# Altium footprint library Connectors.PcbLib: 113 footprints (part 7 of 8)
Each footprint in its own frame and in the unit in brackets; x right, y up, seen from the top. Pads: shape width x height; smd on the part's side, far side on the other; paste and mask are expansions set on the pad; w line width, h text height; cw(c..) or ccw(c..) is an arc to the next point about the centre after c.
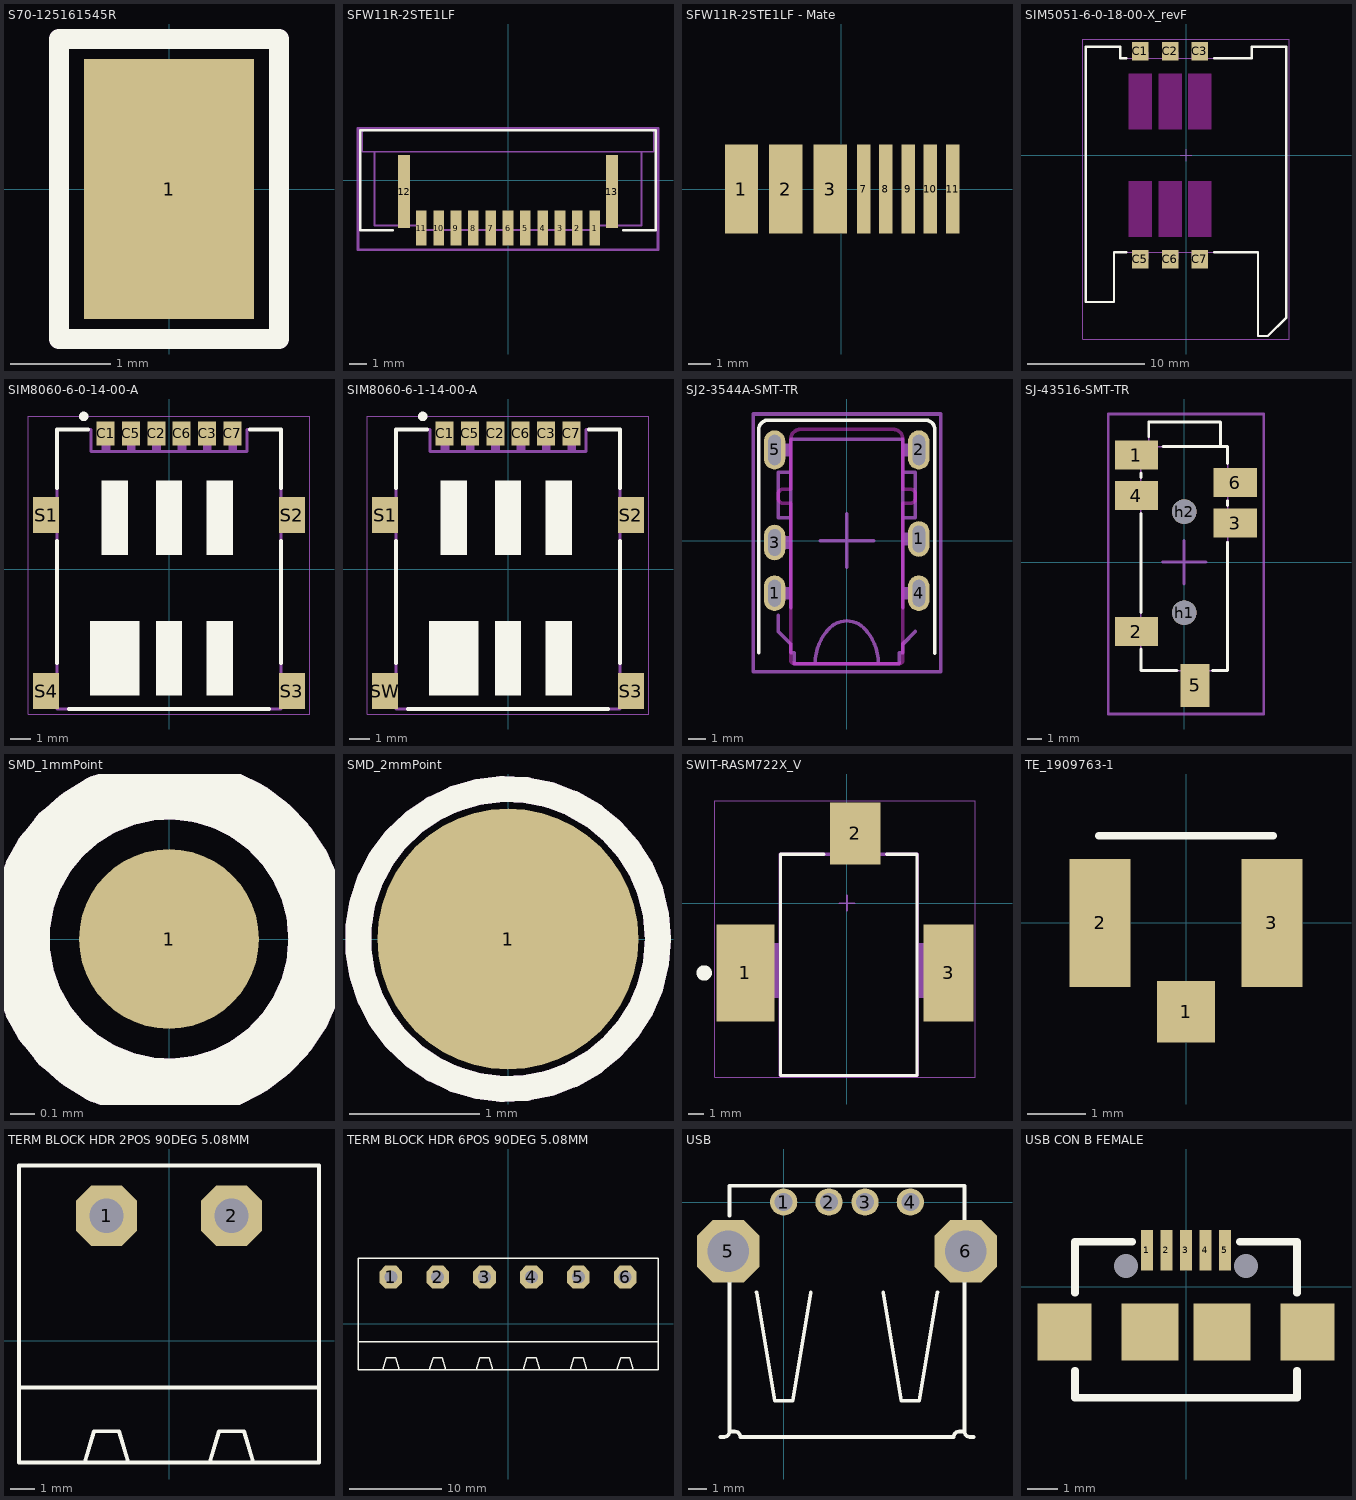
[diagram p6: the footprints below, top view; thin cyan lines are the x and y axes]

## S70-125161545R [mm] "Pin Header, pitch 2.54 mm, THT, Vertical, single row, 4p"
height 8.54
pads (1):
  rect 1.7x2.6 smd: 1(0,0)
Top Overlay:
  lines w0.2: -1.1,-1.5 1.1,-1.5 1.1,1.5 -1.1,1.5 -1.1,-1.5
Top Assembly:
  lines w0.2: -1.1,-1.5 1.1,-1.5 1.1,1.5 -1.1,1.5 -1.1,-1.5
  text ".Designator" at 0.167,-2.499 h0.5
3D body "S70-125161545R v1.step": height 0.16, standoff 0.01, extent -0.8,-1.25 0.8,1.25

## SFW11R-2STE1LF [mil]
pads (13):
  rect 24x79 smd: 1(196.85,-108.5) 2(157.48,-108.5) 3(118.11,-108.5) 4(78.74,-108.5) 5(39.37,-108.5) 6(0,-108.5) 7(-39.37,-108.5) 8(-78.74,-108.5) 9(-118.11,-108.5) 10(-157.48,-108.5) 11(-196.85,-108.5)
  rect 28x165 smd: 12(-236,-25.5) 13(236,-25.5)
Top Overlay:
  lines w6: -261.89,-113.5 -335.5,-113.5 -335.5,113.5 335.5,113.5 335.5,-113.5 261.89,-113.5
Top Assembly:
  rectangle: -201.78,-144.07 -191.94,-112.57
  rectangle: -162.41,-144.07 -152.57,-112.57
  rectangle: -123.04,-144.07 -113.2,-112.57
  rectangle: -83.67,-144.07 -73.83,-112.57
  rectangle: -44.3,-144.07 -34.46,-112.57
  rectangle: -4.93,-144.07 4.91,-112.57
  rectangle: 34.44,-144.07 44.28,-112.57
  rectangle: 73.81,-144.07 83.65,-112.57
  rectangle: 113.18,-144.07 123.02,-112.57
  rectangle: 152.55,-144.07 162.39,-112.57
  rectangle: 191.92,-144.07 201.76,-112.57
  lines w3.94: -330.71,111.84 ccw(c-330.7,111.83) -330.71,111.83 ; -330.71,111.84 cw(c-326.71,107.84) -326.71,113.5 -303.16,113.5 303.16,113.5 326.71,113.5 cw(c326.71,107.84) 330.71,111.84 ; -330.71,111.83 -330.71,64.59 -303.16,64.59 ; -303.16,64.59 303.16,64.59 ; -303.16,64.59 -303.16,-102.73 -201.78,-102.73 -201.78,-112.57 201.78,-112.57 201.78,-102.73 303.16,-102.73 303.16,64.59 ; 303.16,64.59 330.71,64.59 330.71,111.83 ; 330.71,111.83 ccw(c330.7,111.83) 330.71,111.84
  text ".Designator" at -196.79,-13.12 h39.37
Mechanical 15:
  lines w6: -340.5,-158 -340.5,118.5 340.5,118.5 340.5,-158 -340.5,-158
3D body "SFW11R-2STE1LF--3DModel-STEP-533217.STEP": height 106.3, standoff -0.02, extent -330.71,-144.06 330.71,111.84

## SFW11R-2STE1LF - Mate [mm]
pads (8):
  rect 1.5x4 smd paste-1.003 mask-1.003: 1(-4.5,0) 2(-2.5,0) 3(-0.5,0)
  rect 0.61x4 smd paste-1.003 mask-1.003: 7(1,0) 8(2,0) 9(3,0) 10(4,0) 11(5,0)

## SIM5051-6-0-18-00-X_revF [mm] "SIM Card Connector, Hinged Type, 6 Pin, SMT, 1.85mm Profile"
height 1.85
pads (6):
  rect 1.4x1.6 smd: C1(-3.9,8.85) C2(-1.36,8.85) C3(1.18,8.85) C5(-3.9,-8.85) C6(-1.36,-8.85) C7(1.18,-8.85)
Top Layer keep-out:
  rectangle: -4.9,2.2 -2.9,6.95
  rectangle: -2.36,2.2 -0.36,6.95
  rectangle: 0.18,2.2 2.18,6.95
  rectangle: 0.18,-6.95 2.18,-2.2
  rectangle: -2.36,-6.95 -0.36,-2.2
  rectangle: -4.9,-6.95 -2.9,-2.2
Top Overlay:
  lines w0.2: -5.1,-8.25 -6.13,-8.25 -6.13,-12.5 -8.55,-12.5 -8.55,9.25 -5.6,9.25 -5.6,8.25 -5.1,8.25 ; 2.4,-8.25 6.13,-8.25 6.13,-15.4 6.97,-15.4 8.55,-13.82 8.55,9.25 5.6,9.25 5.6,8.25 2.4,8.25
Top Assembly:
  region: 1.88,8.841 0.48,8.841 0.48,8.25 1.88,8.25
  region: -0.66,8.841 -2.06,8.841 -2.06,8.25 -0.66,8.25
  region: -3.2,8.841 -4.6,8.841 -4.6,8.25 -3.2,8.25
  rectangle: 0.48,-8.841 1.88,-8.25
  rectangle: -2.06,-8.841 -0.66,-8.25
  rectangle: -4.6,-8.841 -3.2,-8.25
  lines w0.1: -8.55,-12.5 -6.13,-12.5 -6.13,-8.25 6.13,-8.25 6.13,-15.4 6.97,-15.4 8.55,-13.82 8.55,9.25 5.6,9.25 5.6,8.25 -5.6,8.25 -5.6,9.25 -8.55,9.25 -8.55,-12.5
  text ".Designator" at -5.038,-0.321 h1
Mechanical 15:
  lines w0.05: -8.8,-15.65 8.8,-15.65 8.8,9.9 -8.8,9.9 -8.8,-15.65
  lines w0.1: -0.5,0 0.5,0 ; 0,-0.5 0,0.5
3D body "SIM5051-6-0-18-00-A.stp": height 1.91, standoff 0.01, extent -8.85,-15.429 8.85,9.221

## SIM8060-6-0-14-00-A [mm]
pads (10):
  rect 0.9x1.2 smd: C1(-3.175,6.8) C2(-0.635,6.8) C3(1.905,6.8) C5(-1.905,6.8) C6(0.635,6.8) C7(3.175,6.8)
  rect 1.3x1.8 smd: S1(-6.15,2.7) S2(6.15,2.7) S3(6.15,-6.1) S4(-6.15,-6.1)
Top Overlay:
  circle w0.24: c-4.267,7.645 r0.12
  region: 1.89,-2.6 3.19,-2.6 3.19,-6.3 1.89,-6.3
  region: -0.65,-2.6 0.65,-2.6 0.65,-6.3 -0.65,-6.3
  region: -3.93,-2.6 -1.49,-2.6 -1.49,-6.3 -3.93,-6.3
  region: -3.36,4.42 -2.06,4.42 -2.06,0.72 -3.36,0.72
  region: -0.65,4.42 0.65,4.42 0.65,0.72 -0.65,0.72
  region: 1.89,4.42 3.19,4.42 3.19,0.72 1.89,0.72
  lines w0.2: -5.6,-4.699 -5.6,1.397 ; -5.6,4.064 -5.6,7 -4.064,7 ; -5,-7 5,-7 ; 4.064,7 5.6,7 5.6,4.064 ; 5.6,-4.699 5.6,1.397
Top Assembly:
  rectangle: 5.6,2.14 6.217,3.237
  rectangle: 5.6,-6.66 6.217,-5.563
  region: -5.6,-5.54 -6.217,-5.54 -6.217,-6.637 -5.6,-6.637
  region: -5.6,3.26 -6.217,3.26 -6.217,2.163 -5.6,2.163
  rectangle: -3.38,5.9 -2.94,7.098
  rectangle: -2.11,5.9 -1.67,7.098
  rectangle: -0.84,5.9 -0.4,7.098
  rectangle: 0.43,5.9 0.87,7.098
  rectangle: 1.7,5.9 2.14,7.098
  rectangle: 2.97,5.9 3.41,7.098
  lines w0.15: -5.6,7 -5.6,-7 5.6,-7 5.6,7 3.9,7 3.9,5.9 -3.9,5.9 -3.9,7 -4,7 -5.6,7
  text ".Designator" at -7.618,-0.508 h1.52
Mechanical 15:
  lines w0.05: -7.05,-7.25 7.05,-7.25 7.05,7.65 -7.05,7.65 -7.05,-7.25
3D body "SIM8060-6-0-14-00-A.stp": height 1.41, standoff -0.02, extent -6.2,-7 6.2,7.1

## SIM8060-6-1-14-00-A [mm]
pads (10):
  rect 0.9x1.2 smd: C1(-3.175,6.8) C2(-0.635,6.8) C3(1.905,6.8) C5(-1.905,6.8) C6(0.635,6.8) C7(3.175,6.8)
  rect 1.3x1.8 smd: S1(-6.15,2.7) S2(6.15,2.7) S3(6.15,-6.1) SW(-6.15,-6.1)
Top Overlay:
  circle w0.24: c-4.267,7.645 r0.12
  region: 1.89,-2.6 3.19,-2.6 3.19,-6.3 1.89,-6.3
  region: -0.65,-2.6 0.65,-2.6 0.65,-6.3 -0.65,-6.3
  region: -3.93,-2.6 -1.49,-2.6 -1.49,-6.3 -3.93,-6.3
  region: -3.36,4.42 -2.06,4.42 -2.06,0.72 -3.36,0.72
  region: -0.65,4.42 0.65,4.42 0.65,0.72 -0.65,0.72
  region: 1.89,4.42 3.19,4.42 3.19,0.72 1.89,0.72
  lines w0.2: -5.6,-4.699 -5.6,1.397 ; -5.6,4.064 -5.6,7 -4.064,7 ; -5,-7 5,-7 ; 4.064,7 5.6,7 5.6,4.064 ; 5.6,-4.699 5.6,1.397
Top Assembly:
  rectangle: 5.6,2.14 6.217,3.237
  rectangle: 5.6,-6.66 6.217,-5.563
  region: -5.6,-5.54 -6.217,-5.54 -6.217,-6.637 -5.6,-6.637
  region: -5.6,3.26 -6.217,3.26 -6.217,2.163 -5.6,2.163
  rectangle: -3.38,5.9 -2.94,7.098
  rectangle: -2.11,5.9 -1.67,7.098
  rectangle: -0.84,5.9 -0.4,7.098
  rectangle: 0.43,5.9 0.87,7.098
  rectangle: 1.7,5.9 2.14,7.098
  rectangle: 2.97,5.9 3.41,7.098
  lines w0.15: -5.6,7 -5.6,-7 5.6,-7 5.6,7 3.9,7 3.9,5.9 -3.9,5.9 -3.9,7 -4,7 -5.6,7
  text ".Designator" at -7.618,-0.508 h1.52
Mechanical 15:
  lines w0.05: -7.05,-7.25 7.05,-7.25 7.05,7.65 -7.05,7.65 -7.05,-7.25
3D body "SIM8060-6-1-14-00-A.stp": height 1.41, standoff -0.02, extent -6.2,-7 6.2,7.1

## SJ2-3544A-SMT-TR [mm]
pads (6):
  oval 1.2x2 hole 0.7 slot 1.5 at 90 deg unplated: 1(-4.054,-2.948) 1(4.046,0.099) 3(-4.054,-0.1) 4(4.046,-2.95)
  oval 1.2x2.2 hole 0.7 slot 1.7 at 90 deg unplated: 2(4.046,5.1) 5(-4.054,5.1)
Top Overlay:
  lines w0.2: -4.945,-6.301 -4.945,6.24 cw(c-4.407,6.24) -4.407,6.779 0,6.779 4.407,6.779 cw(c4.407,6.24) 4.945,6.24 4.945,-6.306
Keep-Out Layer:
  lines w0.2: -3.854,2.4 ccw(c-3.554,2.4) -3.554,2.1 -3.154,2.1 -3.154,-6.3 -3.154,-6.7 ccw(c-2.954,-6.7) -2.954,-6.9 2.954,-6.9 ccw(c2.954,-6.7) 3.154,-6.7 3.154,-6.3 3.154,2.1 3.554,2.1 ccw(c3.554,2.4) 3.854,2.4 3.854,2.575 3.854,2.6 ccw(c3.554,2.6) 3.554,2.9 3.154,2.9 3.154,5.7 ccw(c2.6,5.7) 2.6,6.253 -2.6,6.253 ccw(c-2.6,5.7) -3.154,5.7 -3.154,2.9 -3.554,2.9 ccw(c-3.554,2.6) -3.854,2.6 -3.854,2.575 -3.854,2.4
Top Assembly:
  rectangle: -4.054,4.743 -3.154,5.458
  rectangle: -4.054,-0.457 -3.154,0.258
  rectangle: -4.054,-3.305 -3.154,-2.59
  region: 4.046,-2.593 3.146,-2.593 3.146,-3.308 4.046,-3.308
  region: 4.046,0.456 3.146,0.456 3.146,-0.259 4.046,-0.259
  region: 4.046,5.457 3.146,5.457 3.146,4.742 4.046,4.742
  lines w0.2: -3.854,-4.196 -3.854,-5.1 -3.154,-5.8 -3.154,-6.3 -2.954,-6.3 -2.954,-6.9 0,-6.9 2.954,-6.9 2.954,-6.3 3.154,-6.3 3.154,-5.8 3.854,-5.1 ; -3.854,2.4 -3.854,2.6 ; -3.154,-3.75 -3.154,1.3 ; -1.778,-6.897 cw(c1.059,-6.897) -0.947,-4.891 ; -0.952,-4.893 cw(c-0.002,-5.842) -0.002,-4.5 cw(c-0.002,-5.836) 0.942,-4.891 cw(c-1.064,-6.897) 1.773,-6.897 ; 3.154,-3.75 3.154,1.3 ; 3.854,2.4 3.854,2.6 ; -3.154,1.3 -3.854,1.3 -3.854,3.85 -3.154,3.85 ; -3.154,1.3 -3.154,2.1 -3.154,3.85 ; -3.154,3.85 -3.154,5.7 0,5.7 3.154,5.7 3.154,3.85 ; 3.154,1.3 3.854,1.3 3.854,3.85 3.154,3.85 ; 3.154,1.3 3.154,2.9 3.154,3.85
  text ".Designator" at 0.25,-3.749 h0.75
Mechanical 15:
  lines w0.2: -1.5,0 1.5,0 ; 0,-1.5 0,1.5 ; -5.25,-7.356 5.274,-7.356 5.274,7.119 -5.25,7.119 -5.25,-7.356
3D body "CUI_DEVICES_SJ2-3544A-SMT-TR v4.step": height 3.79, standoff -0.82, extent -4.154,-6.9 4.146,5.7

## SJ-43516-SMT-TR [mm]
pads (8):
  rect 3x2 smd: 1(-3.3,7.4) 2(-3.3,-4.8) 3(3.525,2.7) 4(-3.3,4.6) 6(3.525,5.5)
  rect 2x3 smd: 5(0.75,-8.525)
  round 1.7 hole 1.7 unplated: h1(0,-3.5) h2(0,3.5)
Top Overlay:
  lines w0.2: -3,-5.998 -3,-7.5 -0.503,-7.5 ; -3,-3.474 -3,3.355 ; -3,5.86 -3,6.18 ; -2.45,8.687 -2.45,9.7 2.5,9.7 2.5,8 ; -1.476,8 2.5,8 ; 1.962,-7.5 3,-7.5 3,1.381 ; 3,3.925 3,4.247 ; 3,6.833 3,8 2.5,8
Top Assembly:
  region: 1.25,-9.5 1.25,-7.5 0.25,-7.5 0.25,-9.5
  rectangle: 3,5 4.5,6
  rectangle: 3,2.25 4.5,3.25
  rectangle: -4.5,7 -3,7.75
  rectangle: -4.5,4 -3,5.25
  rectangle: -4.5,-5.25 -3,-4.25
  lines w0.1: -2.45,8 -2.45,9.7 2.5,9.7 2.5,8 ; -2.45,8 -3,8 -3,-7.5 3,-7.5 3,8 2.5,8 ; -2.45,8 2.5,8
  text ".Designator" at 0.508,-7.617 h1.52
Mechanical 15:
  lines w0.2: -1.5,0 1.5,0 ; 0,-1.5 0,1.5 ; -5.25,-10.5 -5.25,10.25 5.5,10.25 5.5,-10.5 -5.25,-10.5
3D body "CUI_DEVICES_SJ-43516-SMT-TR.step": height 5.11, standoff -0.69, extent -4.5,-9.5 4.5,9.7

## SMD_1mmPoint [mm]
pads (1):
  round 0.75 smd paste-2539.97: 1(0,0)
Top Overlay:
  circle w0.254: c0,0 r0.625
Top Assembly:
  circle w0.254: c0,0 r0.625
  text ".Designator" at -1.749,-0.117 h0.35

## SMD_2mmPoint [mm]
pads (1):
  round 2 smd: 1(0,0)
Top Overlay:
  circle w0.2: c0,0 r1.15
Top Assembly:
  circle w0.2: c0,0 r1.15
  text ".Designator" at -1.749,-0.117 h0.35

## SWIT-RASM722X_V [mm] "SMD, 3-Leads, Body 14.5x9mm"
height 11
pads (3):
  rect 3.81x6.35 smd: 1(-6.645,-4.57)
  rect 3.3x4.06 smd: 2(0.545,4.57)
  rect 3.3x6.35 smd: 3(6.645,-4.57)
Top Overlay:
  circle w0.5: c-9.35,-4.57 r0.25
  lines w0.2: -1.505,3.2 -4.34,3.2 -4.34,-11.3 4.595,-11.3 4.595,3.2 2.595,3.2
Top Assembly:
  rectangle: 0.128,3.2 1.8,5.8
  rectangle: -7.172,-6.2 -4.3,-2.6
  rectangle: 4.628,-6.2 7.5,-2.6
  lines w0.2: -4.373,-11.3 -4.373,3.2 4.628,3.2 4.628,-11.3 -4.373,-11.3
  text ".Designator" at -7.498,-0.5 h1.5
Mechanical 15:
  lines w0.05: -8.65,-11.4 -8.65,6.7 8.395,6.7 8.395,-11.4 -8.65,-11.4
  lines w0.1: -0.5,0 0.5,0 ; 0,-0.5 0,0.5
3D body "RASM722X.STEP": height 11.1, standoff 0.04, extent -7.505,-11.227 7.504,5.842

## TE_1909763-1 [mm]
pads (3):
  rect 1x1.05 smd: 1(0,-1.525)
  rect 1.05x2.2 smd: 2(-1.475,0) 3(1.475,0)
Top Overlay:
  lines w0.127: -1.5,1.5 1.5,1.5
3D body "1909763-1.STEP": height 1.24, standoff 0.01, extent -1.5,-1.55 1.5,1.55

## TERM BLOCK HDR 2POS 90DEG 5.08MM [mm]
pads (2):
  oct 2.459x2.459 / inner oct 1.524x1.524 / far side oct 2.459x2.459 hole 1.4: 1(-2.54,5.08) 2(2.54,5.08)
Top Overlay:
  lines w0.152: -6.096,-1.905 -6.096,-4.953 -3.429,-4.953 ; -6.096,-1.905 -6.096,7.112 -3.175,7.112 -1.905,7.112 1.905,7.112 3.175,7.112 6.096,7.112 6.096,-1.905 ; -6.096,-1.905 6.096,-1.905 ; -3.429,-4.953 -3.048,-3.683 -2.032,-3.683 -1.651,-4.953 ; -3.429,-4.953 -1.651,-4.953 ; -1.651,-4.953 1.651,-4.953 ; 1.651,-4.953 3.429,-4.953 ; 1.651,-4.953 2.032,-3.683 3.048,-3.683 3.429,-4.953 ; 3.429,-4.953 6.096,-4.953 6.096,-1.905
3D body "5.08_90Deg_2Pin.step": height 8.61, standoff -3.49, extent -6.08,-4.902 6.08,7.1
3D body "5.08_90Deg_2Pin_Disi.step": height 15.01, standoff 0.01, extent -5.08,-14.3 5.08,3.9

## TERM BLOCK HDR 6POS 90DEG 5.08MM [mm]
pads (6):
  oct 2.459x2.459 / inner oct 1.524x1.524 / far side oct 2.459x2.459 hole 1.397: 1(-12.7,5.08)
  oct 2.459x2.459 / inner oct 1.524x1.524 / far side oct 2.459x2.459 hole 1.4: 2(-7.62,5.08) 3(-2.54,5.08) 4(2.54,5.08) 5(7.62,5.08) 6(12.7,5.08)
Top Overlay:
  lines w0.152: -16.256,-1.905 -16.256,-4.953 -13.589,-4.953 ; -16.256,-1.905 -16.256,7.112 -13.335,7.112 -12.065,7.112 -8.255,7.112 -6.985,7.112 -3.175,7.112 -1.905,7.112 1.905,7.112 3.175,7.112 6.985,7.112 8.255,7.112 12.065,7.112 13.335,7.112 16.256,7.112 16.256,-1.905 ; -16.256,-1.905 16.256,-1.905 ; -13.589,-4.953 -13.208,-3.683 -12.192,-3.683 -11.811,-4.953 ; -13.589,-4.953 -11.811,-4.953 ; -11.811,-4.953 -8.509,-4.953 ; -8.509,-4.953 -6.731,-4.953 ; -8.509,-4.953 -8.128,-3.683 -7.112,-3.683 -6.731,-4.953 ; -6.731,-4.953 -3.429,-4.953 ; -3.429,-4.953 -3.048,-3.683 -2.032,-3.683 -1.651,-4.953 ; -3.429,-4.953 -1.651,-4.953 ; -1.651,-4.953 1.651,-4.953 ; 1.651,-4.953 3.429,-4.953 ; 1.651,-4.953 2.032,-3.683 3.048,-3.683 3.429,-4.953 ; 3.429,-4.953 6.731,-4.953 ; 6.731,-4.953 7.112,-3.683 8.128,-3.683 8.509,-4.953 ; 6.731,-4.953 8.509,-4.953 ; 8.509,-4.953 11.811,-4.953 ; 11.811,-4.953 13.589,-4.953 ; 11.811,-4.953 12.192,-3.683 13.208,-3.683 13.589,-4.953 ; 13.589,-4.953 16.256,-4.953 16.256,-1.905
3D body "5.08_90Deg_6Pin_Disi.step": height 15.01, standoff 0.01, extent -15.24,-14.3 15.24,3.9
3D body "5.08_90Deg_6Pin.step": height 8.61, standoff -3.49, extent -16.24,-4.902 16.24,7.1

## USB [mm]
pads (6):
  round 1.508 / inner round 1.524 / far side round 1.508 hole 1: 1(0,0) 2(2.5,0) 3(4.5,0) 4(7,0)
  oct 3.45x3.45 / inner oct 1.524x1.524 / far side oct 3.45x3.45 hole 2.3: 5(-3.07,-2.71) 6(10.07,-2.71)
Top Overlay:
  lines w0.203: -3.5,-12.99 -3.3,-12.99 ccw(c-3.3,-12.69) -3,-12.69 ; -3,-3.99 -3,-12.69 ; -3,-0.75 -3,0.91 10,0.91 10,-1.49 ; -1.5,-4.99 -0.5,-10.99 0.5,-10.99 1.5,-4.99 ; 5.5,-4.99 6.5,-10.99 7.5,-10.99 8.5,-4.99 ; 10,-3.99 10,-12.69 ; 10.5,-12.99 10.3,-12.99 cw(c10.3,-12.69) 10,-12.69 ; -3,-12.69 -2.7,-12.69 cw(c-2.7,-12.99) -2.4,-12.99 9.4,-12.99 cw(c9.7,-12.99) 9.7,-12.69 10,-12.69 ; -3,-12.69 -3,-12.69
3D body "TypeA.stp": height 7.77, standoff -3.6, extent -4.615,-13.1 11.617,0.9

## USB CON B FEMALE [mm]
pads (11):
  rect 0.4x1.35 smd: 1(-1.3,1.22) 2(-0.65,1.22) 3(0,1.22) 4(0.65,1.22) 5(1.3,1.22)
  round 0 hole 0.8: 7(2,0.7) 8(-2,0.7)
  rect 1.8x1.9 smd: ""(-4.05,-1.5) ""(4.05,-1.5)
  rect 1.9x1.9 smd: ""(-1.2,-1.5) ""(1.2,-1.5)
Top Overlay:
  lines w0.254: -3.7,-2.8 -3.7,-3.7 3.7,-3.7 3.7,-2.8 ; -3.7,-0.2 -3.7,1.5 -1.8,1.5 ; 1.8,1.5 3.7,1.5 3.7,-0.2
3D body "MicroUsb.step": height 2.74, standoff -0.2, extent -4.1,-4.08 4.1,1.85